# Altium footprint library SHDR2W50P0X150_1X2_450X350X450P.PcbLib: 1 footprints
Each footprint in its own frame and in the unit in brackets; x right, y up, seen from the top. Pads: shape width x height; smd on the part's side, far side on the other; paste and mask are expansions set on the pad; w line width, h text height; cw(c..) or ccw(c..) is an arc to the next point about the centre after c.
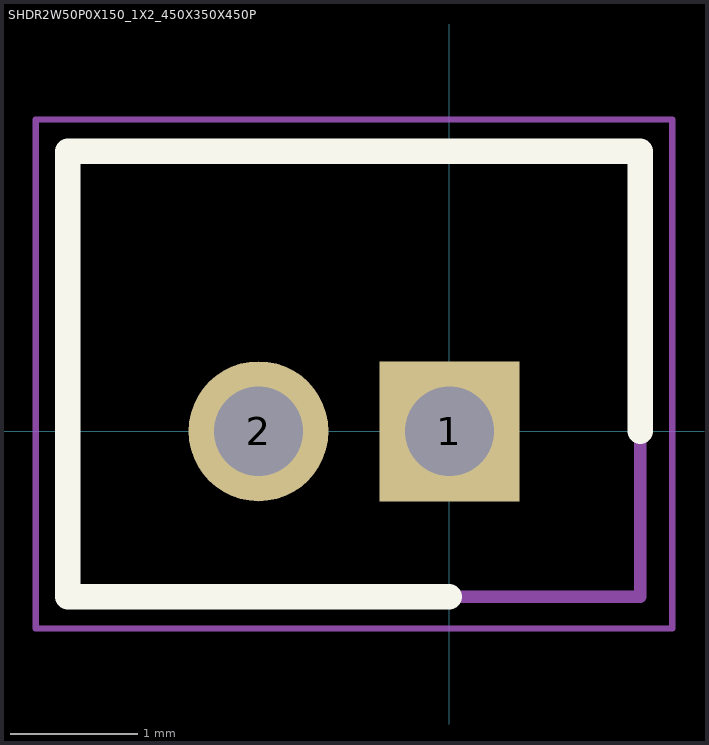
[diagram p0: the footprint, top view; thin cyan lines are the x and y axes]

## SHDR2W50P0X150_1X2_450X350X450P [mm]
pads (2):
  rect 1.1x1.1 / inner round 1.1 / far side rect 1.1x1.1 hole 0.7: 1(0,0)
  round 1.1 hole 0.7: 2(-1.5,0)
Top Overlay:
  lines w0.2: 0,-1.3 -3,-1.3 -3,2.2 1.5,2.2 1.5,0
Mechanical 15:
  lines w0.1: -3,-1.3 1.5,-1.3 1.5,2.2 -3,2.2 -3,-1.3
Mechanical 20:
  lines w0.05: -3.25,-1.55 1.75,-1.55 1.75,2.45 -3.25,2.45 -3.25,-1.55